# Altium footprint library Relay.PcbLib: 36 footprints (part 2 of 3)
Each footprint in its own frame and in the unit in brackets; x right, y up, seen from the top. Pads: shape width x height; smd on the part's side, far side on the other; paste and mask are expansions set on the pad; w line width, h text height; cw(c..) or ccw(c..) is an arc to the next point about the centre after c.
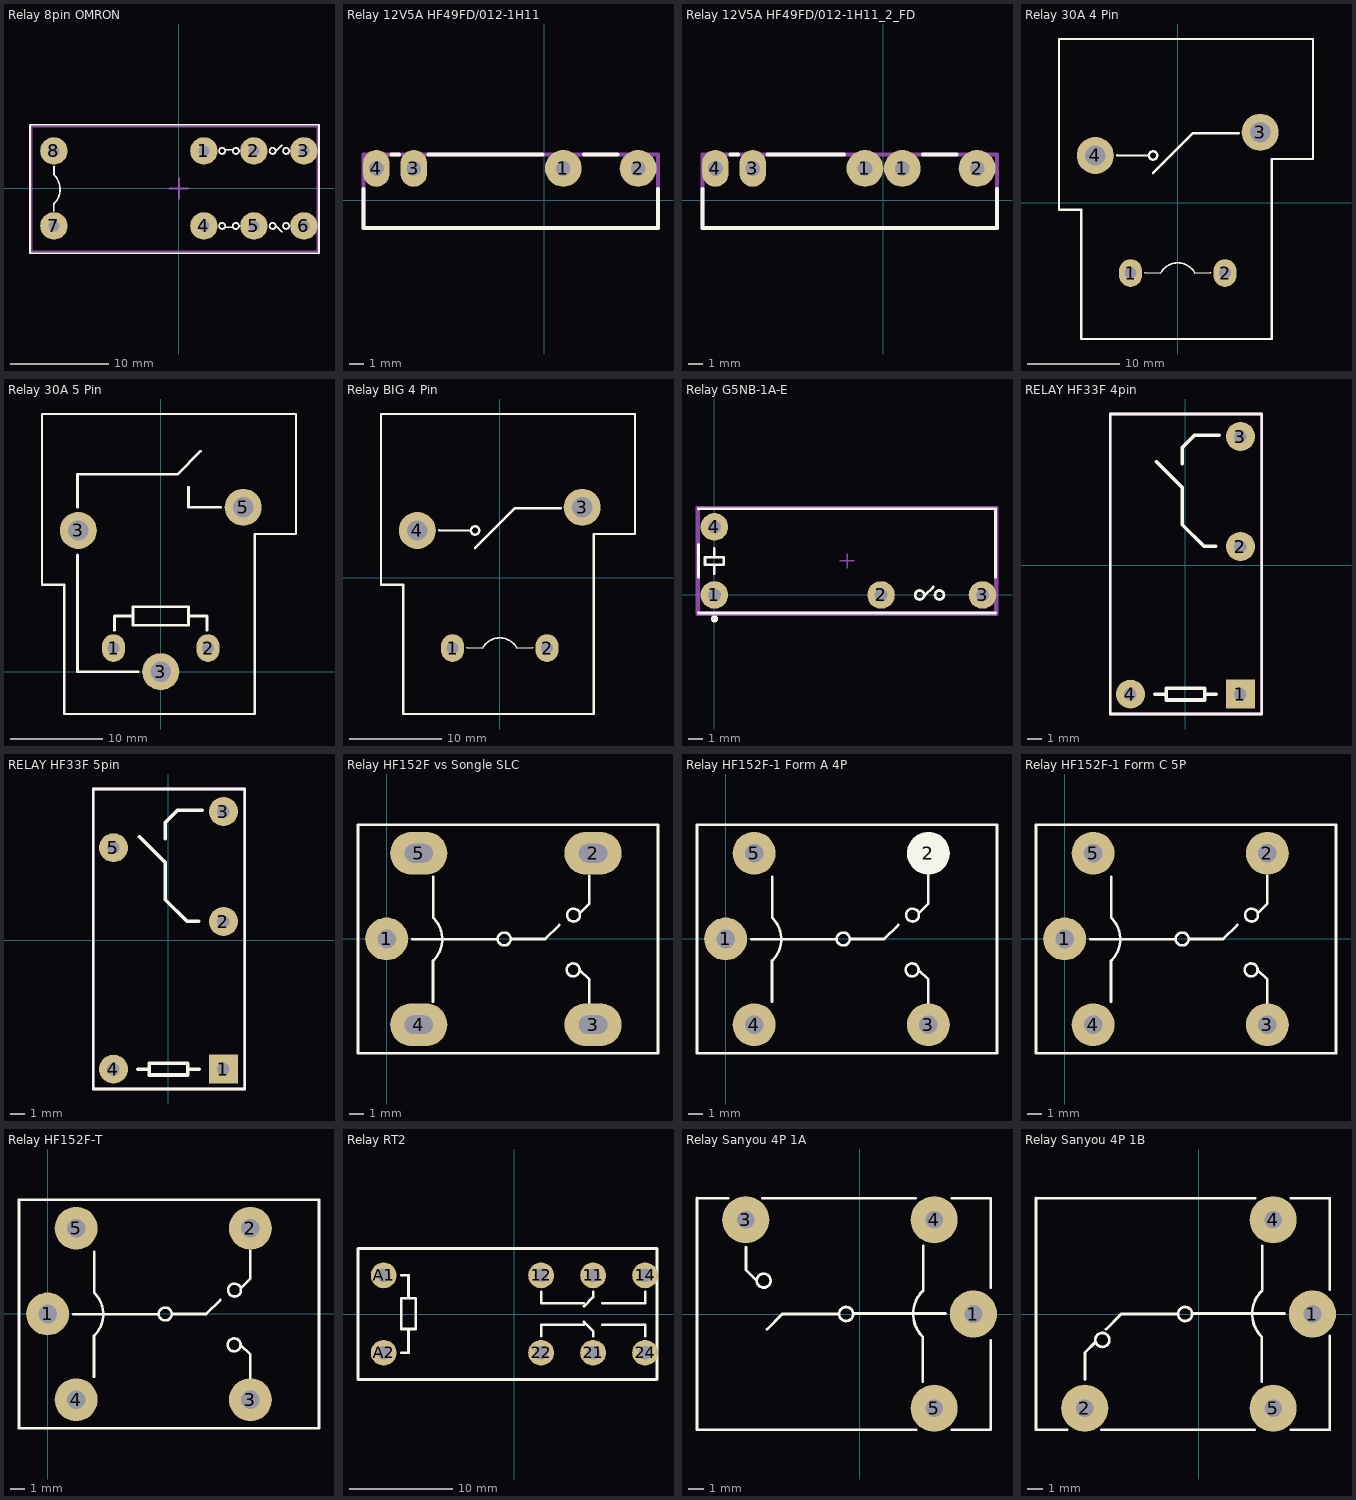
[diagram p1: the footprints below, top view; thin cyan lines are the x and y axes]

## Relay 8pin OMRON [mil] "Reley DPDT, 8P 12.7*15.7*29"
height 618.11
pads (8):
  round 110 hole 45: 1(100,150) 2(300,150) 3(500,150) 4(100,-150) 5(300,-150) 6(500,-150) 7(-500,-150) 8(-500,150)
Top Overlay:
  circle w7: c428.76,-150 r12.24
  circle w7: c374.76,-150 r12.24
  circle w7: c227.76,-150 r12.24
  circle w7: c172.76,-150 r12.24
  circle w7: c172.76,150 r12.24
  circle w7: c227.76,150 r12.24
  circle w7: c374.76,150 r12.24
  circle w7: c428.76,150 r12.24
  lines w7: -501,-90 -501,-63 ; -500,-62 ccw(c-557.5,-3.5) -499,54 ; -500,55 -500,88 ; 187,-155 216,-155 ; 187,155 216,155 ; 388,-149 412,-173 ; 388,149 412,173 ; -595.5,-259.35 560.25,-259.35 560.24,254.66 -595.5,254.65 -595.49,-259.35
Top Designator:
  lines w7: -588.49,-252.36 -588.49,247.64 553.24,247.64 553.24,-252.36 -588.49,-252.36
  lines w7.87: -38.37,-0.5 37.37,-0.5 ; 1,-39.87 1,38.87
  text ".Designator" at -163.7,-15.89 h60
3D body "Relay_Omron_G2RL14EDC24BYOMB_eec.STEP": height 618.15, standoff -137.8, extent -584.55,-248.43 549.31,243.7

## Relay 12V5A HF49FD/012-1H11 [mm] "12x20x5mm"
pads (4):
  round 2.5 hole 1: 1(1.285,2.165) 2(6.365,2.165)
  oval 1.8x2.5 hole 1: 3(-8.875,2.165) 4(-11.415,2.165)
Top Overlay:
  lines w0.254: -12.285,0.765 -12.285,-1.885 7.715,-1.885 7.715,0.765 ; -10.415,3.115 -9.875,3.115 ; -7.875,3.115 -0.115,3.115 ; 2.685,3.115 4.965,3.115
Top Designator:
  text ".Designator" at -3.745,0.521 h1.52
Mechanical 15:
  lines w0.254: -12.285,-1.885 7.715,-1.885 7.715,3.115 -12.285,3.115 -12.285,-1.885
3D body "relay.STEP": height 3.8, standoff -12.5, extent -12.285,-1.885 7.715,3.115

## Relay 12V5A HF49FD/012-1H11_2_FD [mm] "12x20x5mm"
pads (5):
  round 2.5 hole 1: 1(-1.255,2.165) 1(1.285,2.165) 2(6.365,2.165)
  oval 1.8x2.5 hole 1: 3(-8.875,2.165) 4(-11.415,2.165)
Top Overlay:
  lines w0.254: -12.285,0.765 -12.285,-1.885 7.715,-1.885 7.715,0.765 ; -10.415,3.115 -9.875,3.115 ; -7.875,3.115 -2.655,3.115 ; 2.685,3.115 4.965,3.115
Top Designator:
  text ".Designator" at -3.745,0.521 h1.52
Mechanical 15:
  lines w0.254: -12.285,-1.885 7.715,-1.885 7.715,3.115 -12.285,3.115 -12.285,-1.885
3D body "relay.STEP": height 3.8, standoff -12.5, extent -12.285,-1.885 7.715,3.115

## Relay 30A 4 Pin [mm]
pads (4):
  oval 2.5x3 hole 1.3: 1(-5.1,-7.6) 2(5.1,-7.6)
  round 4 hole 2.2: 3(8.9,7.6) 4(-8.9,5.1)
Top Overlay:
  circle w0.254: c-2.667,5.1 r0.452
  lines w0.178: -3.531,-7.575 -1.84,-7.596 ; -1.84,-7.592 cw(c0,-8.57) 1.84,-7.592 ; 1.84,-7.596 3.531,-7.575
  lines w0.254: -6.553,5.125 -3.175,5.1 ; -2.667,3.195 1.651,7.513 6.604,7.513 ; -12.827,-0.742 -12.827,17.673 14.605,17.673 14.605,4.719 10.16,4.719 10.16,-14.712 -10.414,-14.712 -10.414,-0.742 -12.827,-0.742
Top Designator:
  text ".Designator" at -3.24,1.149 h1.52
3D body "SW3dPS-relay_t90_spdt.STEP": height 21.42, standoff -5.93, extent -13.792,-14.382 13.717,17.825

## Relay 30A 5 Pin [mm]
pads (5):
  oval 2.5x3 hole 1.3: 1(-5.1,2.54) 2(5.1,2.54)
  round 4 hole 2.2: 3(-8.9,15.24) 3(0,0) 5(8.9,17.74)
Top Overlay:
  lines w0.254: -12.827,9.398 -12.827,27.813 14.605,27.813 14.605,14.859 10.16,14.859 10.16,-4.572 -10.414,-4.572 -10.414,9.398 -12.827,9.398
  lines w0.3: -9,12.598 -9,0 -2.438,0 ; -9,17.74 -9,21.3 1.8,21.3 4.3,23.8 ; -5,4.47 -5,6 -3,6 ; 3,6 5,6 5,4.47 ; 3,19.9 3,17.74 6.477,17.74 ; -3,5 -3,7 3,7 3,5 -3,5
Top Designator:
  text ".Designator" at -3.24,11.289 h1.52
3D body "SW3dPS-relay_t90_spdt.STEP": height 21.42, standoff -5.93, extent -13.792,-4.242 13.717,27.965

## Relay BIG 4 Pin [mm]
pads (4):
  oval 2.5x3 hole 1.3: 1(-5.1,-7.6) 2(5.1,-7.6)
  round 4 hole 2.2: 3(8.9,7.6) 4(-8.9,5.1)
Top Overlay:
  circle w0.254: c-2.667,5.1 r0.452
  lines w0.178: -3.531,-7.575 -1.84,-7.596 ; -1.84,-7.592 cw(c0,-8.57) 1.84,-7.592 ; 1.84,-7.596 3.531,-7.575
  lines w0.254: -6.553,5.125 -3.175,5.1 ; -2.667,3.195 1.651,7.513 6.604,7.513 ; -12.827,-0.742 -10.414,-0.742 -10.414,-14.712 10.16,-14.712 10.16,4.719 14.605,4.719 14.605,17.673 -12.827,17.673 -12.827,-0.742
Top Designator:
  text ".Designator" at -3.24,1.149 h1.52
3D body "SW3dPS-relay_t90_spdt.STEP": height 21.42, standoff -5.93, extent -13.792,-14.382 13.717,17.825

## Relay G5NB-1A-E [mm]
pads (4):
  round 1.9 hole 0.9: 1(0,0) 2(11.5,0) 3(18.5,0) 4(0,4.7)
Top Overlay:
  circle w0.25: c0,-1.65 r0.125
  circle w0.178: c14.161,0 r0.311
  circle w0.178: c15.533,0 r0.311
  lines w0.178: 0,1.474 0,2.096 ; 0,2.604 0,3.226 ; 14.497,-0.051 15.107,0.559 ; -0.648,2.096 -0.648,2.604 0.648,2.604 0.648,2.096 -0.648,2.096
  lines w0.2: -1.1,-1.225 -1.1,-1.25 19.4,-1.25 19.4,-1.225 ; -1.1,1.225 -1.1,3.475 ; -1.1,5.925 -1.1,5.95 19.4,5.95 19.4,1.225
Top Designator:
  text ".Designator" at 5.44,1.781 h1.52
Top Courtyard:
  lines w0.2: -1.2,-1.35 19.5,-1.35 19.5,6.05 -1.2,6.05 -1.2,-1.35
Mechanical 12:
  lines w0.2: -1.1,-1.25 19.4,-1.25 19.4,5.95 -1.1,5.95 -1.1,-1.25
Mechanical 15:
  lines w0.1: 8.65,2.35 9.65,2.35 ; 9.15,1.85 9.15,2.85
  lines w0.2: -1.2,-1.35 19.5,-1.35 19.5,6.05 -1.2,6.05 -1.2,-1.35
3D body "Relay_Omron_G5NB-1A-E_DC12_eec.STEP": height 15.3, standoff -3.4, extent -1.05,-1.15 19.35,5.85

## RELAY HF33F 4pin [mm]
pads (4):
  rect 2x2 hole 0.864: 1(3.8,-8.9)
  round 2 hole 0.864: 2(3.8,1.3) 3(3.8,8.9) 4(-3.8,-8.9)
Top Overlay:
  lines w0.2: -5.197,-10.272 -5.197,10.455 5.268,10.455 5.268,-10.272 -5.197,-10.272
  lines w0.254: -2.118,-8.9 -1.331,-8.9 ; -1.997,7.153 -1.184,6.34 -0.219,5.375 -0.219,4.74 -0.219,2.809 1.28,1.311 2.093,1.311 ; -0.219,7.026 -0.219,8.143 0.62,8.982 2.321,8.982 ; 1.331,-8.9 2.118,-8.9 ; -1.331,-9.306 -1.331,-8.494 1.331,-8.494 1.331,-9.306 -1.331,-9.306
Top Designator:
  lines w0.2: -5.197,-10.272 -5.197,10.455 5.242,10.455 5.242,-10.272 -5.197,-10.272
  text ".Designator" at -3.675,-0.252 h1.52
Mechanical 6:
  lines w0.2: -5.197,-10.272 -5.197,10.455 5.242,10.455 5.242,-10.272 -5.197,-10.272
3D body "hf33f.stp": height 15.4, standoff -3.75, extent -5.07,-10.17 5.13,10.33

## RELAY HF33F 5pin [mm]
pads (5):
  rect 2x2 hole 0.864: 1(3.8,-8.9)
  round 2 hole 0.864: 2(3.8,1.3) 3(3.8,8.9) 4(-3.8,-8.9) 5(-3.8,6.4)
Top Overlay:
  lines w0.2: -5.197,-10.272 -5.197,10.455 5.268,10.455 5.268,-10.272 -5.197,-10.272
  lines w0.254: -2.118,-8.9 -1.331,-8.9 ; -1.997,7.153 -1.184,6.34 -0.219,5.375 -0.219,4.74 -0.219,2.809 1.28,1.311 2.093,1.311 ; -0.219,7.026 -0.219,8.143 0.62,8.982 2.321,8.982 ; 1.331,-8.9 2.118,-8.9 ; -1.331,-9.306 1.331,-9.306 1.331,-8.494 -1.331,-8.494 -1.331,-9.306
Top Designator:
  lines w0.2: -5.197,-10.272 -5.197,10.455 5.242,10.455 5.242,-10.272 -5.197,-10.272
  text ".Designator" at -3.675,-0.252 h1.52
Mechanical 6:
  lines w0.2: -5.197,-10.272 -5.197,10.455 5.242,10.455 5.242,-10.272 -5.197,-10.272
3D body "hf33f.stp": height 15.4, standoff -3.75, extent -5.07,-10.17 5.13,10.33

## Relay HF152F vs Songle SLC [mm] "Relay HF152F-T W16 L21 H20.6"
height 20.6
pads (5):
  round 3 hole 1.3: 1(0,0)
  oval 4x3 hole 1.3 slot 2 at 0 deg: 2(14.454,6) 3(14.454,-6) 4(2.254,-6) 5(2.254,6)
Top Overlay:
  circle w0.178: c13.061,-2.159 r0.452
  circle w0.178: c13.086,1.676 r0.452
  circle w0.178: c8.235,0 r0.452
  lines w0.178: -2,-8.001 -2,7.999 ; -2,-8 19,-8 19,8 -2,8 ; 1.803,-0.025 7.722,-0.025 ; 3.251,-4.394 3.251,-1.524 ; 3.277,-1.499 ccw(c1.816,-0.013) 3.302,1.448 ; 3.277,1.473 3.277,4.369 ; 8.763,0 11.1,0 12.09,0.991 ; 13.513,-2.159 14.199,-2.845 14.199,-4.521 ; 13.538,1.829 14.199,2.489 14.199,4.42
Top Designator:
  text ".Designator" at 4.79,-0.344 h1.52
3D body "HF152F.stp": height 20.7, standoff -3.2, extent -2,-8.001 19,7.999

## Relay HF152F-1 Form A 4P [mm] "Relay HF152F-T W16 L21 H20.6"
height 20.6
pads (5):
  round 3 hole 1.3: 1(0,0) 3(14.2,-6) 4(2,-6) 5(2,6)
  round 3 on Top Overlay: 2(14.2,6)
Top Overlay:
  circle w0.178: c13.061,-2.159 r0.452
  circle w0.178: c13.086,1.676 r0.452
  circle w0.178: c8.235,0 r0.452
  lines w0.178: -2,-8.001 -2,7.999 ; -2,-8 19,-8 19,8 -2,8 ; 1.803,-0.025 7.722,-0.025 ; 3.251,-4.394 3.251,-1.524 ; 3.277,-1.499 ccw(c1.816,-0.013) 3.302,1.448 ; 3.277,1.473 3.277,4.369 ; 8.763,0 11.1,0 12.09,0.991 ; 13.513,-2.159 14.199,-2.845 14.199,-4.521 ; 13.538,1.829 14.199,2.489 14.199,4.42
Top Designator:
  text ".Designator" at 4.79,-0.344 h1.52
3D body "HF152F.stp": height 20.7, standoff -3.2, extent -2,-8.001 19,7.999

## Relay HF152F-1 Form C 5P [mm] "Relay HF152F-T W16 L21 H20.6"
height 20.6
pads (5):
  round 3 hole 1.3: 1(0,0) 2(14.2,6) 3(14.2,-6) 4(2,-6) 5(2,6)
Top Overlay:
  circle w0.178: c8.235,0 r0.452
  circle w0.178: c13.086,1.676 r0.452
  circle w0.178: c13.061,-2.159 r0.452
  lines w0.178: -2,-8.001 -2,7.999 ; -2,-8 19,-8 19,8 -2,8 ; 1.803,-0.025 7.722,-0.025 ; 3.251,-4.394 3.251,-1.524 ; 3.277,-1.499 ccw(c1.816,-0.013) 3.302,1.448 ; 3.277,1.473 3.277,4.369 ; 8.763,0 11.1,0 12.09,0.991 ; 13.513,-2.159 14.199,-2.845 14.199,-4.521 ; 13.538,1.829 14.199,2.489 14.199,4.42
Top Designator:
  text ".Designator" at 4.79,-0.344 h1.52
3D body "HF152F.stp": height 20.7, standoff -3.2, extent -2,-8.001 19,7.999

## Relay HF152F-T [mm] "Relay HF152F-T W16 L21 H20.6"
height 20.6
pads (5):
  round 3 hole 1.3: 1(0,0) 2(14.2,6) 3(14.2,-6) 4(2,-6) 5(2,6)
Top Overlay:
  circle w0.178: c8.235,0 r0.452
  circle w0.178: c13.086,1.676 r0.452
  circle w0.178: c13.061,-2.159 r0.452
  lines w0.178: -2,-8.001 -2,7.999 ; -2,-8 19,-8 19,8 -2,8 ; 1.803,-0.025 7.722,-0.025 ; 3.251,-4.394 3.251,-1.524 ; 3.277,-1.499 ccw(c1.816,-0.013) 3.302,1.448 ; 3.277,1.473 3.277,4.369 ; 8.763,0 11.1,0 12.09,0.991 ; 13.513,-2.159 14.199,-2.845 14.199,-4.521 ; 13.538,1.829 14.199,2.489 14.199,4.42
Top Designator:
  text ".Designator" at 4.79,-0.344 h1.52
3D body "HF152F.stp": height 20.7, standoff -3.2, extent -2,-8.001 19,7.999

## Relay RT2 [mm]
pads (8):
  round 2.5 hole 1.3: 11(7.63,3.75) 12(2.59,3.75) 14(12.67,3.75) 21(7.63,-3.75) 22(2.59,-3.75) 24(12.67,-3.75) A1(-12.67,3.75) A2(-12.67,-3.75)
Top Overlay:
  lines w0.254: -10.97,-3.75 -10.27,-3.75 -10.27,-1.45 ; -10.97,3.75 -10.27,3.75 -10.27,1.55 ; 2.59,-2.15 2.59,-1.05 6.73,-1.05 ; 2.59,2.15 2.59,1.05 6.73,1.05 ; 6.73,-0.75 7.63,-1.65 7.63,-2.15 ; 6.73,0.75 7.63,1.65 7.63,2.15 ; 8.53,-1.05 12.67,-1.05 12.67,-2.15 ; 8.53,1.05 12.67,1.05 12.67,2.15 ; -15.159,-6.341 13.822,-6.341 13.822,6.359 -15.159,6.359 -15.159,-5.96 -15.159,-6.341 ; -10.97,-1.45 -10.97,0.05 -10.97,1.55 -9.57,1.55 -9.57,0.05 -9.57,-1.45 -10.97,-1.45
Top Designator:
  text ".Designator" at -4.343,-0.335 h1.52
3D body "User Library-RT2.STEP": height 15.91, standoff -3.4, extent -15.17,-6.35 13.83,6.35

## Relay Sanyou 4P 1A [mil] "SANYOU 4 Pin 1A"
height 800
pads (4):
  round 120 hole 45: 1(290,0) 3(-290,240) 4(190,240) 5(190,-240)
Top Overlay:
  circle w7: c-34.2,0 r17.8
  circle w7: c-244.2,85 r17.8
  lines w7: -414,295 -335,295 ; -414,295.28 -414,-295 144,-295 ; -289,170 -289,112 -262,85 ; -247,295 143,295 ; -236,-39 -197,0 -54,0 ; -14,1 219,1 ; 160,-57 cw(c218.5,0.5) 161,59 ; 161,-172 161,-58 ; 162,60 162,173 ; 235,-295 334,-295 334,-66.65 ; 235,295 334,295 334,66.65
Top Designator:
  text ".Designator" at -177.83,-13.54 h60
3D body "relay srd05vdc-sl-c.SLDPRT": height 594.88, standoff -173.23, extent -414.02,-295.28 334.01,295.27

## Relay Sanyou 4P 1B [mil] "SANYOU 4 Pin 1B"
height 800
pads (4):
  round 120 hole 45: 1(290,0) 2(-290,-240) 4(190,240) 5(190,-240)
Top Overlay:
  circle w7: c-34.2,0 r17.8
  circle w7: c-245.2,-66 r17.8
  lines w7: -414,295 144,295 ; -414,295.28 -414,-295 -335,-295 ; -289,-167 -289,-98 -263,-72 ; -247,-295 143,-295 ; -236,-39 -197,0 -54,0 ; -14,1 219,1 ; 160,-57 cw(c218.5,0.5) 161,59 ; 161,-172 161,-58 ; 162,60 162,173 ; 235,-295 334,-295 334,-56 ; 235,295 334,295 334,62
Top Designator:
  text ".Designator" at -177.83,-13.54 h60
3D body "relay srd05vdc-sl-c.SLDPRT": height 594.88, standoff -173.23, extent -414.02,-295.28 334.01,295.27